# Altium schematic symbol library MCP1725-3302E_SNVAO.SchLib: 1 symbol
Pins are listed as number, name and electrical type; pins without a type are passive.

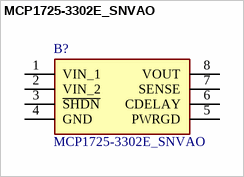
[diagram p0: symbol MCP1725-3302E_SNVAO]

## MCP1725-3302E_SNVAO
designator B?
Linear Voltage Regulator IC Output SOIC-8 Fixed  -40C to +125C  3.3V; Manufacturer_Name: Microchip; Manufacturer_Part_Number: MCP1725-3302E/SNVAO; Geometry.Height: 1.75mm; Mouser Part Number: *; Mouser Price/Stock: *; Datasheet Link: https://ww1.microchip.com/downloads/aemDocuments/documents/APID/ProductDocuments/DataSheets/MCP1725-500-mA%2C-Low-Voltage%2C-Low-Quiescent-Current-LDO-Regulator-20002026C.pdf
footprint SOIC127P600X175-8N
pins: 1 VIN_1, 2 VIN_2, 3 ~{SHDN}, 4 GND, 5 PWRGD, 6 CDELAY, 7 SENSE, 8 VOUT